# Altium integrated library DRV8873HPWPRQ1.IntLib: 1 symbol
Pins are listed as number, name and electrical type; pins without a type are passive.

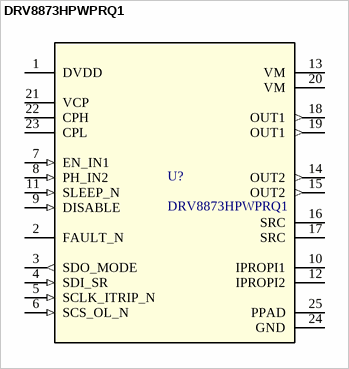
[diagram p0: symbol DRV8873HPWPRQ1]

## DRV8873HPWPRQ1
designator U?
Automotive, current sensing 40V, 10A H-bridge motor driver with integrated current feedback 24-HTSSOP -40 to 125; Manufacturer_Name: Texas Instruments; TYPE: TYPE; RefDes: RefDes; Copyright: Copyright (C) 2026 Ultra Librarian. All rights reserved.; Manufacturer_Part_Number: DRV8873HPWPRQ1
footprint PWP0024J_N
pins: 1 DVDD (power), 2 FAULT_N (oc), 3 SDO_MODE (out), 4 SDI_SR (in), 5 SCLK_ITRIP_N (in), 6 SCS_OL_N (in), 7 EN_IN1 (in), 8 PH_IN2 (in), 9 DISABLE (in), 10 IPROPI1, 11 SLEEP_N (in), 12 IPROPI2, 13 VM (power), 14 OUT2 (out), 15 OUT2 (out), 16 SRC, 17 SRC, 18 OUT1 (out), 19 OUT1 (out), 20 VM (power), 21 VCP (power), 22 CPH (power), 23 CPL (power), 24 GND (power), 25 PPAD (power)